# Altium footprint library CKey_Pcb.PcbLib: 41 footprints (part 3 of 3)
Each footprint in its own frame and in the unit in brackets; x right, y up, seen from the top. Pads: shape width x height; smd on the part's side, far side on the other; paste and mask are expansions set on the pad; w line width, h text height; cw(c..) or ccw(c..) is an arc to the next point about the centre after c.
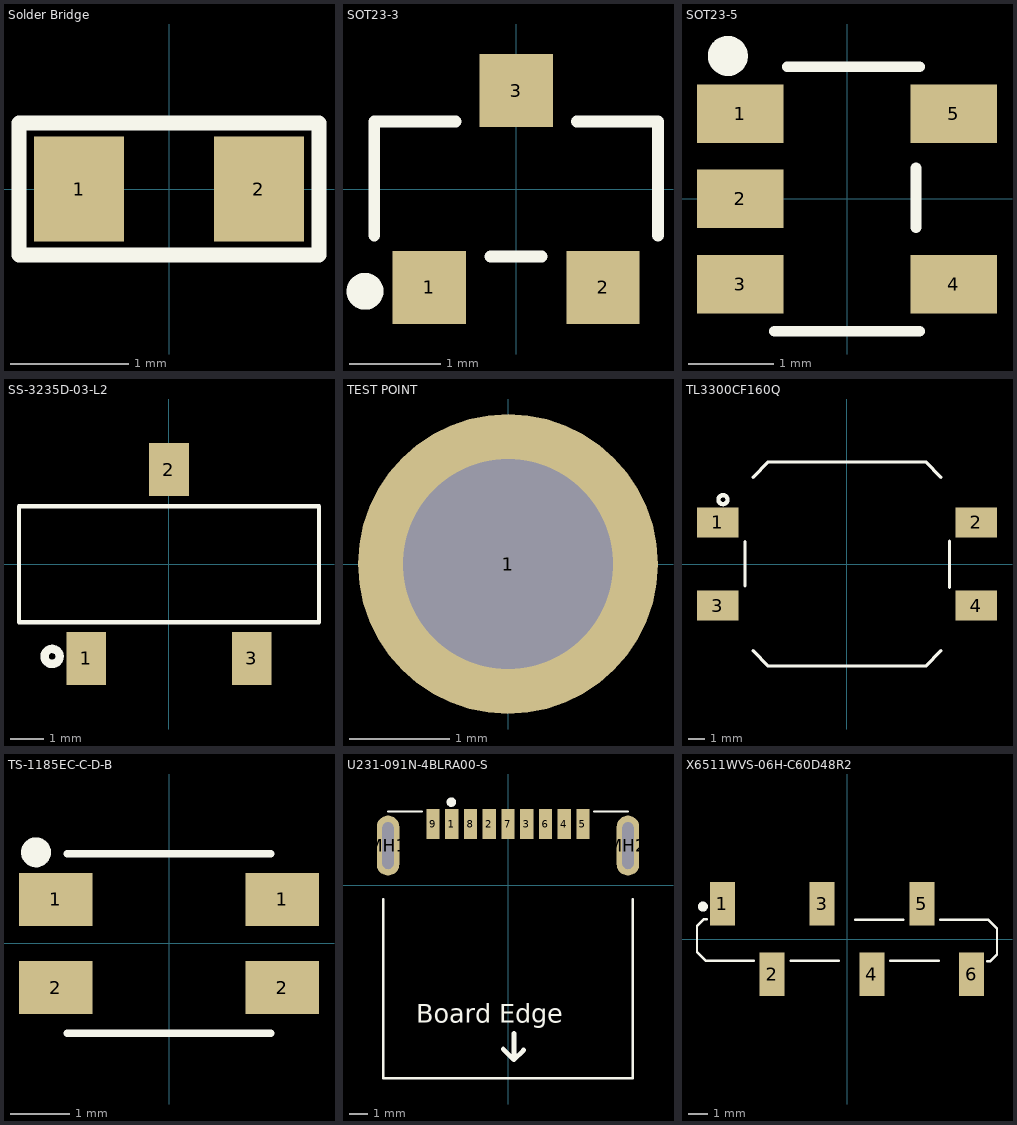
[diagram p2: the footprints below, top view; thin cyan lines are the x and y axes]

## Solder Bridge [mil] "Solder Bridge ON"
pads (2):
  rect 30x35 smd: 1(-30,0) 2(30,0)
Top Overlay:
  lines w5: -50,-22 50,-22 50,22 -50,22 -50,-22

## SOT23-3 [mm] "SOT23, 3-Leads, Body 2.9x1.3mm, Pitch 0.95mm, Lead Span 2.3mm - Reverse Pinning, IPC High Density"
height 1.1
pads (3):
  rect 0.8x0.8 smd: 1(-0.95,-1.075) 2(0.95,-1.075) 3(0,1.075)
Top Overlay:
  circle w0.25: c-1.651,-1.118 r0.076
  lines w0.127: -1.55,-0.508 -1.55,0.737 -0.661,0.737 ; -0.28,-0.737 0.279,-0.737 ; 0.66,0.737 1.549,0.737 1.549,-0.508
3D body "CircuitWorks-SOT-23.step": height 1.05, standoff -0.05, extent -1.5,-1.25 1.5,1.25

## SOT23-5 [mil] "SOT23-5 Package"
height 51.18
pads (5):
  rect 40x27 smd: 1(-49.21,39.37) 2(-49.21,0) 3(-49.21,-39.37) 4(49.21,-39.37) 5(49.21,39.37)
Top Overlay:
  circle w10: c-55,66 r4.24
  lines w5: -33.46,-61.02 33.46,-61.02 ; -27.56,61.02 33.46,61.02 ; 31.79,-13.19 31.79,14.37
3D body "User Library-SOT-23-5-1.STEP": height 43.31, standoff -0.06, extent -45.92,-58.19 52.51,59.92

## SS-3235D-03-L2 [mm] "SPDT 50mA @ 12VDC 12V On-On SMD Toggle Switches RoHS"
pads (3):
  rect 1.2x1.6 smd: 1(-2.5,-2.85) 3(2.5,-2.85)
  rect 1.21x1.6 smd: 2(0,2.85)
Top Overlay:
  circle w0.254: c-3.531,-2.794 r0.227
  lines w0.127: -4.532,-1.758 4.536,-1.758 4.536,1.747 -4.532,1.747 -4.532,-1.758
3D body "ss-3235d-03-l2.stp": height 6.4, standoff 0, extent -4.499,-3.45 4.551,3.45

## TEST POINT [mm]
pads (1):
  round 3 hole 2.1: 1(0,0)
Top Overlay:
  circle w0.127: c0,0 r1.169

## TL3300CF160Q [mm] "SWITCH TACTILE SPST-NO 0.05A 12V"
height 8.5
pads (4):
  rect 2.5x1.8 smd: 1(-7.75,2.5) 2(7.75,2.5) 3(-7.75,-2.5) 4(7.75,-2.5)
Top Overlay:
  circle w0.254: c-7.442,3.861 r0.27
  lines w0.2: -6.121,-1.295 -6.121,1.342 ; -5.639,-5.207 -4.724,-6.121 4.724,-6.121 5.639,-5.207 ; -5.639,5.207 -4.724,6.121 4.724,6.121 5.639,5.207 ; 6.147,-1.397 6.147,1.368
3D body "TL3300CFxxxQ (1).stp": height 8.77, standoff -0.03, extent -7.5,-5.98 7.5,6.02

## TS-1185EC-C-D-B [mm]
pads (4):
  rect 1.25x0.9 smd: 1(-1.925,0.75) 1(1.925,0.75) 2(-1.925,-0.75) 2(1.925,-0.75)
Top Overlay:
  circle w0.254: c-2.261,1.549 r0.127
  lines w0.127: -1.727,-1.524 1.727,-1.524 ; -1.727,1.524 1.727,1.524
3D body "ts-1185ec-c-d-b.stp": height 2, standoff 0, extent -2.325,-1.5 2.325,1.5

## U231-091N-4BLRA00-S [mm] "USB 3.0 1 Surface Mount 9 Female -40?~+85? Type-A SMD USB Connectors ROHS"
pads (11):
  rect 0.7x1.6 smd: 1(-3,3.275) 2(-1,3.275) 3(1,3.275) 4(3,3.275) 5(4,3.275) 6(2,3.275) 7(0,3.275) 8(-2,3.275) 9(-4,3.275)
  oval 1.2x3.2 hole 0.6 slot 2.5 at 90 deg: MH1(-6.4,2.125) MH2(6.4,2.125)
Top Overlay:
  circle w0.254: c-3.023,4.442 r0.127
  lines w0.127: -6.654,-0.737 -6.654,-10.284 6.654,-10.284 6.654,-0.737 ; -6.4,3.941 -4.584,3.941 ; 4.584,3.941 6.4,3.941
  lines w0.254: -0.253,-8.727 0.318,-9.298 ; 0.318,-7.901 0.318,-9.298 ; 0.834,-8.782 0.318,-9.298
  text "Board Edge" at -4.889,-7.314 h1
3D body "U231-091N-4BLRA00-S-1_C381140-4.STEP": height 6.84, standoff -1.81, extent -6.6,-10.288 6.6,3.912

## X6511WVS-06H-C60D48R2 [mm] "250V 3A Brick nogging Square Pins 2.5mm 260? 6mm -40?~+105? 1 6 2.54mm Brass 1x6P SMD,P=2.54mm Pin Headers ROHS"
pads (6):
  rect 1.27x2.2 smd: 1(-6.35,1.8) 2(-3.81,-1.8) 3(-1.27,1.8) 4(1.27,-1.8) 5(3.81,1.8) 6(6.35,-1.8)
Top Overlay:
  circle w0.254: c-7.341,1.651 r0.127
  lines w0.127: -7.135,1.013 -7.288,1.013 -7.641,0.66 -7.641,-0.66 -7.206,-1.096 -4.75,-1.096 ; -2.87,-1.096 -0.414,-1.096 ; 0.414,0.969 2.87,0.969 ; 2.21,-1.096 4.666,-1.096 ; 4.75,0.969 7.206,0.969 7.641,0.533 7.641,-0.787 ; 7.135,-1.14 7.288,-1.14 7.641,-0.787
3D body "s10129380-906002XLF.stp": height -0.41, standoff -12.3, extent -7.595,-2.413 7.645,2.381